# Altium footprint library George.PcbLib: 34 footprints (part 1 of 3)
Each footprint in its own frame and in the unit in brackets; x right, y up, seen from the top. Pads: shape width x height; smd on the part's side, far side on the other; paste and mask are expansions set on the pad; w line width, h text height; cw(c..) or ccw(c..) is an arc to the next point about the centre after c.
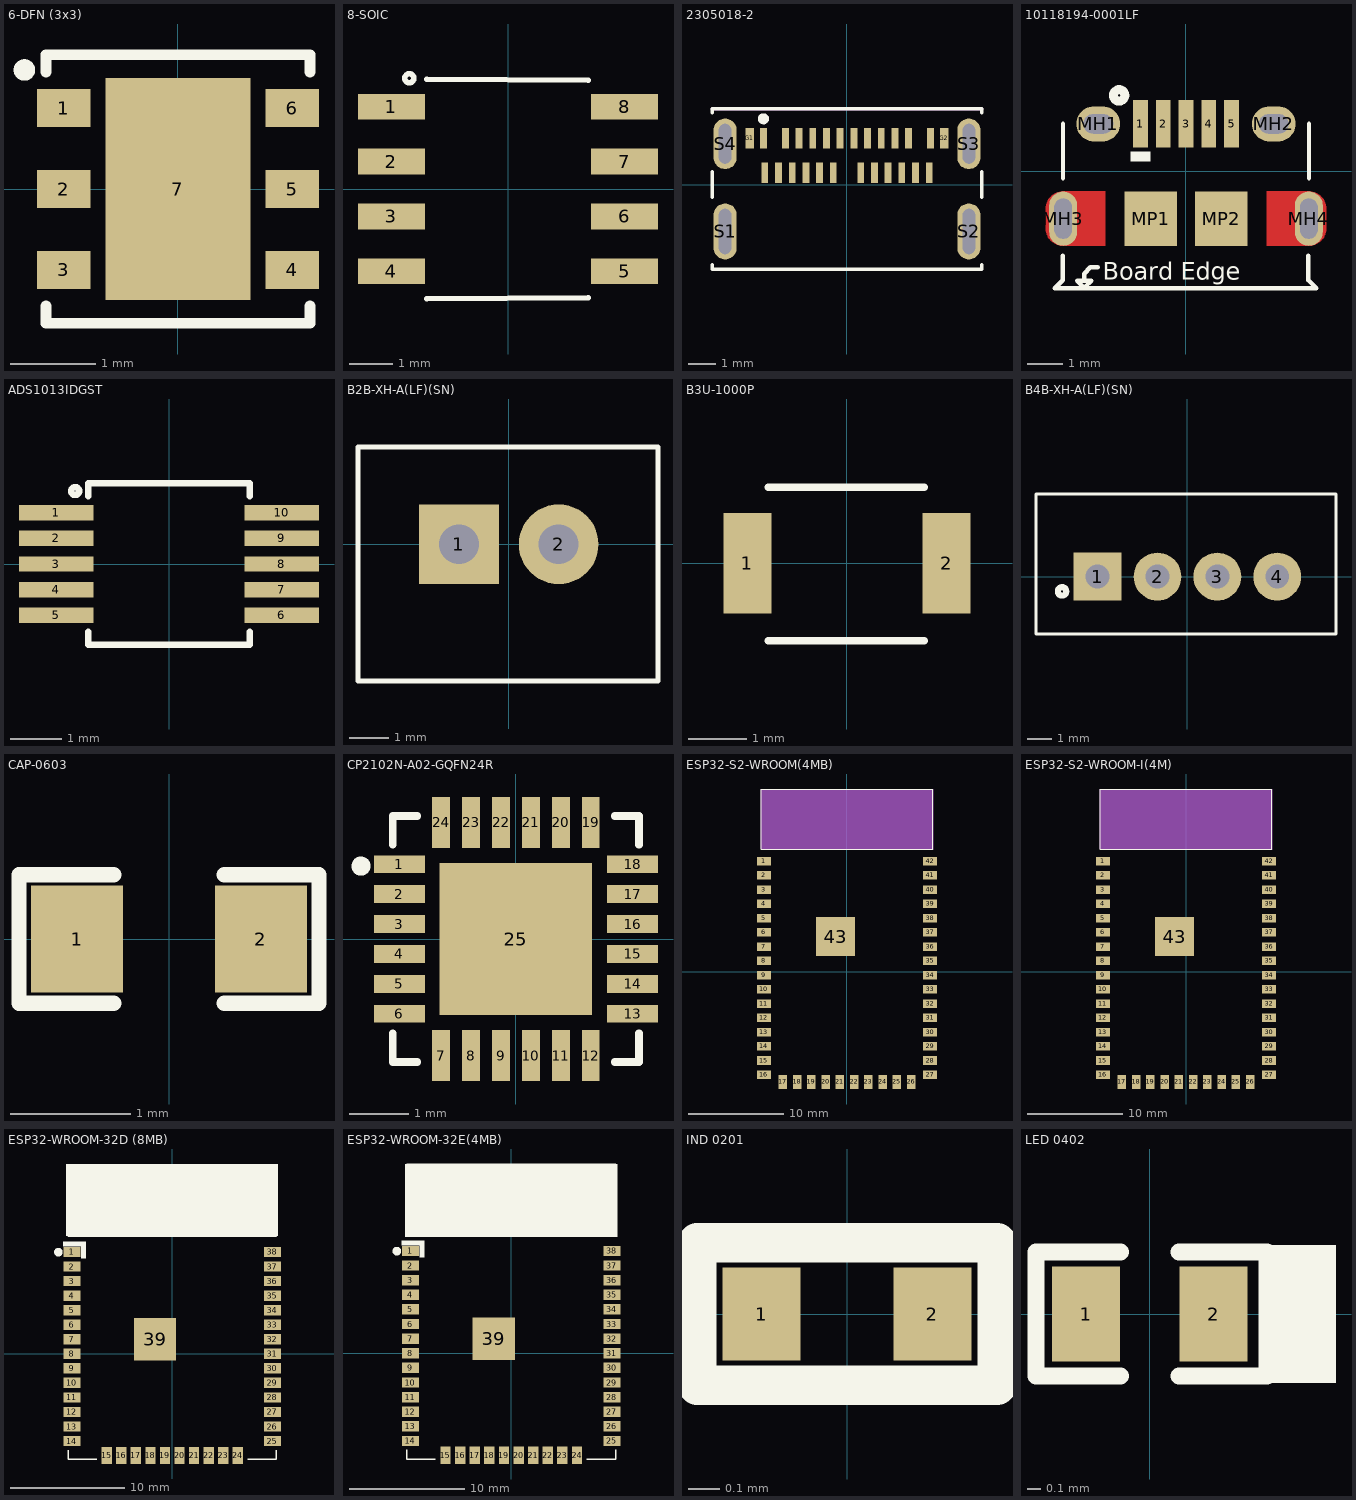
[diagram p0: the footprints below, top view; thin cyan lines are the x and y axes]

## 6-DFN (3x3) [mm]
pads (7):
  rect 0.63x0.45 smd: 1(-1.34,0.95) 2(-1.34,0) 3(-1.34,-0.95) 4(1.34,-0.95) 5(1.34,0) 6(1.34,0.95)
  rect 1.7x2.6 smd: 7(0,0)
Top Overlay:
  circle w0.127: c-1.803,1.397 r0.063
  lines w0.127: -1.549,-1.372 -1.549,-1.575 1.549,-1.575 1.549,-1.372 ; -1.549,1.372 -1.549,1.575 1.549,1.575 1.549,1.372
3D body "DFN6_3X3_ONS.step": height 0.99, standoff 0, extent -1.5,-1.5 1.498,1.498

## 8-SOIC [mm]
pads (8):
  rect 1.55x0.6 smd: 1(-2.7,1.905) 2(-2.7,0.635) 3(-2.7,-0.635) 4(-2.7,-1.905) 5(2.7,-1.905) 6(2.7,-0.635) 7(2.7,0.635) 8(2.7,1.905)
Top Overlay:
  circle w0.127: c-2.286,2.565 r0.105
  lines w0.127: -1.88,-2.54 1.854,-2.515 ; -1.88,2.54 1.854,2.515
3D body "SO8_STM.step": height 1.76, standoff 0, extent -3.073,-2.502 3.125,2.502

## 2305018-2 [mm]
pads (30):
  rect 0.25x0.75 smd: A1(-3.05,1.7) A2(-2.25,1.7) A3(-1.75,1.7) A4(-1.25,1.7) A5(-0.75,1.7) A6(-0.25,1.7) A7(0.25,1.7) A8(0.75,1.7) A9(1.25,1.7) A10(1.75,1.7) A11(2.25,1.7) A12(3.05,1.7) B1(3,0.45) B2(2.5,0.45) B3(2,0.45) B4(1.5,0.45) B5(1,0.45) B6(0.5,0.45) B7(-0.5,0.45) B8(-1,0.45) B9(-1.5,0.45) B10(-2,0.45) B11(-2.5,0.45) B12(-3,0.45)
  rect 0.3x0.75 smd: G1(-3.55,1.7) G2(3.55,1.7)
  oval 0.85x2.05 hole 0.45 slot 1.65 at 90 deg: S1(-4.45,-1.7) S2(4.45,-1.7)
  oval 0.85x1.85 hole 0.45 slot 1.45 at 90 deg: S3(4.45,1.5) S4(-4.45,1.5)
Top Overlay:
  circle w0.2: c-3.05,2.413 r0.1
  lines w0.127: -4.925,-2.906 -4.925,-3.075 4.925,-3.075 4.925,-2.906 ; -4.925,-0.444 -4.925,0.48 ; -4.925,2.634 -4.925,2.775 4.925,2.775 4.925,2.634 ; 4.925,-0.444 4.925,0.48
Mechanical 13:
  lines w0.127: -4.925,2.775 4.925,2.775
3D body "2305018-2--3DModel-STEP-56544.STEP": height 3.53, standoff -0.53, extent -4.919,-5.856 4.919,2.794

## 10118194-0001LF [mm]
pads (11):
  rect 0.42x1.35 smd: 1(-1.3,1.35) 2(-0.65,1.35) 3(0,1.35) 4(0.65,1.35) 5(1.3,1.35)
  oval 1.25x1 hole 0.55 slot 0.85 at 0 deg: MH1(-2.5,1.35) MH2(2.5,1.35)
  oval 0.8x1.55 hole 0.5 slot 1.15 at 90 deg: MH3(-3.5,-1.35) MH4(3.5,-1.35)
  rect 1.5x1.55 smd: MP1(-1,-1.35) MP2(1,-1.35)
Top Layer:
  region: 192 vertices and 0 holes, not listed, extent 2.3,-2.13 4,-0.575
  region: 192 vertices and 0 holes, not listed, extent -4,-2.125 -2.3,-0.57
Top Overlay:
  circle w0.254: c-1.905,2.163 r0.163
  rectangle: -1.575,0.283 -1.016,0.563
  lines w0.127: -3.511,-3.104 -3.511,-2.404 ; -3.511,-3.099 -3.511,-3.109 -3.739,-3.338 3.718,-3.338 3.489,-3.109 ; -3.505,-0.199 -3.505,1.35 ; -2.521,-2.74 -2.725,-2.74 -2.902,-2.918 -2.902,-3.121 ; 3.489,-3.104 3.489,-2.404 ; 3.505,-0.199 3.505,1.35 ; -2.902,-3.121 -2.699,-3.121 -2.862,-3.285 -2.942,-3.285 -3.106,-3.121 -2.902,-3.121
  text "Board Edge" at -2.367,-3.088 h0.5
3D body "10118194-0001LF--3DModel-STEP-56544.STEP": height 2.87, standoff -0.4, extent -4.017,-3.988 4.033,1.542
3D body: height 0.25, standoff 0, extent 2.622,-2.976 2.622,-2.976

## ADS1013IDGST [mm]
pads (10):
  rect 1.45x0.3 smd: 1(-2.2,1) 2(-2.2,0.5) 3(-2.2,0) 4(-2.2,-0.5) 5(-2.2,-1) 6(2.2,-1) 7(2.2,-0.5) 8(2.2,0) 9(2.2,0.5) 10(2.2,1)
Top Overlay:
  circle w0.127: c-1.829,1.422 r0.076
  lines w0.127: -1.575,-1.575 -1.575,-1.321 ; -1.575,1.321 -1.575,1.575 ; -1.549,-1.575 1.575,-1.575 1.575,-1.321 ; -1.549,1.575 1.575,1.575 1.575,1.321
3D body "ADS1013IDGST.STEP": height 1.09, standoff -0.01, extent -2.45,-1.5 2.45,1.5

## B2B-XH-A(LF)(SN) [mm]
pads (2):
  rect 2x2 hole 1: 1(-1.25,0)
  round 2 hole 1: 2(1.25,0)
Top Overlay:
  lines w0.127: -3.782,-3.432 -3.782,2.442 3.74,2.442 3.74,-3.432 -3.782,-3.432
3D body "B2B-XH-A(LF)(SN)--3DModel-STEP-56544.STEP": height 7, standoff -3.4, extent -3.718,-3.366 3.682,2.384

## B3U-1000P [mm] "SWITCH TACTILE SPST-NO 0.05A 12V"
pads (2):
  rect 0.82x1.72 smd: 1(-1.7,0) 2(1.7,0)
Top Overlay:
  lines w0.127: -1.346,-1.321 0,-1.321 1.321,-1.321 ; -1.346,1.295 0,1.295 1.321,1.295
3D body "User Library-OMRON B3U1000P.step": height 1.6, standoff 0, extent -2,-1.263 2,1.237

## B4B-XH-A(LF)(SN) [mm]
pads (4):
  rect 2x2 hole 1: 1(-3.75,0)
  round 2 hole 1: 2(-1.25,0) 3(1.25,0) 4(3.75,0)
Top Overlay:
  circle w0.254: c-5.236,-0.616 r0.176
  lines w0.127: -6.324,-2.398 6.204,-2.398 6.204,3.454 -6.324,3.454 -6.324,-2.398
3D body "B4B-XH-A-LF--SN---3DModel-STEP-56544.STEP": height 7, standoff -3.4, extent -6.258,-2.347 6.142,3.403

## CAP-0603 [mil]
pads (2):
  rect 30x35 smd mask+2.36: 1(-30,0) 2(30,0)
Top Overlay:
  lines w5: -18,-21 -49,-21 -49,21 -18,21 ; 18,-21 49,-21 49,21 18,21
3D body "User Library-CAPC1608X09.step": height 34.25, standoff -1.18, extent -31.51,-15.75 31.49,15.74

## CP2102N-A02-GQFN24R [mm]
pads (25):
  rect 0.85x0.3 smd: 1(-1.95,1.25) 2(-1.95,0.75) 3(-1.95,0.25) 4(-1.95,-0.25) 5(-1.95,-0.75) 6(-1.95,-1.25) 13(1.95,-1.25) 14(1.95,-0.75) 15(1.95,-0.25) 16(1.95,0.25) 17(1.95,0.75) 18(1.95,1.25)
  rect 0.3x0.85 smd: 7(-1.25,-1.95) 8(-0.75,-1.95) 9(-0.25,-1.95) 10(0.25,-1.95) 11(0.75,-1.95) 12(1.25,-1.95) 19(1.25,1.95) 20(0.75,1.95) 21(0.25,1.95) 22(-0.25,1.95) 23(-0.75,1.95) 24(-1.25,1.95)
  rect 2.55x2.55 smd: 25(0,0)
Top Overlay:
  circle w0.217: c-2.591,1.219 r0.051
  lines w0.127: -2.057,-1.575 -2.057,-2.057 -1.651,-2.057 ; -2.057,1.575 -2.057,2.057 -1.651,2.057 ; 1.651,-2.057 2.057,-2.057 2.057,-1.575 ; 1.651,2.057 2.057,2.057 2.057,1.575
3D body "CP2102N-A02-GQFN24R--3DModel-STEP-56544.STEP": height 0.8, standoff 0, extent -2,-2 2,2

## ESP32-S2-WROOM(4MB) [mm] "RX TXRX MOD WIFI SURFACE MOUNT"
pads (43):
  rect 1.5x0.9 smd: 1(-8.75,11.625) 2(-8.75,10.125) 3(-8.75,8.625) 4(-8.75,7.125) 5(-8.75,5.625) 6(-8.75,4.125) 7(-8.75,2.625) 8(-8.75,1.125) 9(-8.75,-0.375) 10(-8.75,-1.875) 11(-8.75,-3.375) 12(-8.75,-4.875) 13(-8.75,-6.375) 14(-8.75,-7.875) 15(-8.75,-9.375) 16(-8.75,-10.875) 27(8.75,-10.875) 28(8.75,-9.375) 29(8.75,-7.875) 30(8.75,-6.375) 31(8.75,-4.875) 32(8.75,-3.375) 33(8.75,-1.875) 34(8.75,-0.375) 35(8.75,1.125) 36(8.75,2.625) 37(8.75,4.125) 38(8.75,5.625) 39(8.75,7.125) 40(8.75,8.625) 41(8.75,10.125) 42(8.75,11.625)
  rect 0.9x1.5 smd: 17(-6.75,-11.625) 18(-5.25,-11.625) 19(-3.75,-11.625) 20(-2.25,-11.625) 21(-0.75,-11.625) 22(0.75,-11.625) 23(2.25,-11.625) 24(3.75,-11.625) 25(5.25,-11.625) 26(6.75,-11.625)
  rect 4.1x4.1 smd: 43(-1.19,3.675)
Top Overlay:
  lines w0.127: -9.025,12.875 -9.025,19.175 9.025,19.175 9.025,12.875 -9.025,12.875
Mechanical 1:
  pour cut-out: 9.1,19.225 -9.1,19.225 -9.1,12.8 9.1,12.8
  text "Board Cutout" at -3.748,15.652 h0.7
3D body "ESP32-S2-WROOM--3DModel-STEP-269445.STEP": height 3.45, standoff 0, extent -9,-11.875 9,19.125

## ESP32-S2-WROOM-I(4M) [mm] "18x31x3.3mm WiFi Modules ROHS"
pads (43):
  rect 1.5x0.9 smd: 1(-8.75,11.625) 2(-8.75,10.125) 3(-8.75,8.625) 4(-8.75,7.125) 5(-8.75,5.625) 6(-8.75,4.125) 7(-8.75,2.625) 8(-8.75,1.125) 9(-8.75,-0.375) 10(-8.75,-1.875) 11(-8.75,-3.375) 12(-8.75,-4.875) 13(-8.75,-6.375) 14(-8.75,-7.875) 15(-8.75,-9.375) 16(-8.75,-10.875) 27(8.75,-10.875) 28(8.75,-9.375) 29(8.75,-7.875) 30(8.75,-6.375) 31(8.75,-4.875) 32(8.75,-3.375) 33(8.75,-1.875) 34(8.75,-0.375) 35(8.75,1.125) 36(8.75,2.625) 37(8.75,4.125) 38(8.75,5.625) 39(8.75,7.125) 40(8.75,8.625) 41(8.75,10.125) 42(8.75,11.625)
  rect 0.9x1.5 smd: 17(-6.75,-11.625) 18(-5.25,-11.625) 19(-3.75,-11.625) 20(-2.25,-11.625) 21(-0.75,-11.625) 22(0.75,-11.625) 23(2.25,-11.625) 24(3.75,-11.625) 25(5.25,-11.625) 26(6.75,-11.625)
  rect 4.1x4.1 smd: 43(-1.19,3.675)
Top Overlay:
  lines w0.127: -9.025,12.875 -9.025,19.175 9.025,19.175 9.025,12.875 -9.025,12.875
Mechanical 1:
  pour cut-out: 9.1,19.225 -9.1,19.225 -9.1,12.8 9.1,12.8
  text "Board Cutout" at -3.748,15.652 h0.7
3D body "ESP32-S2-WROOM_M22S2H3200PH3Q0_.stp": height 3.3, standoff 0, extent -9,-11.875 9,19.125

## ESP32-WROOM-32D (8MB) [mm]
pads (39):
  rect 1.5x0.9 smd: 1(-8.75,8.88) 2(-8.75,7.61) 3(-8.75,6.34) 4(-8.75,5.07) 5(-8.75,3.8) 6(-8.75,2.53) 7(-8.75,1.26) 8(-8.75,-0.01) 9(-8.75,-1.28) 10(-8.75,-2.55) 11(-8.75,-3.82) 12(-8.75,-5.09) 13(-8.75,-6.36) 14(-8.75,-7.63) 25(8.75,-7.63) 26(8.75,-6.36) 27(8.75,-5.09) 28(8.75,-3.82) 29(8.75,-2.55) 30(8.75,-1.28) 31(8.75,-0.01) 32(8.75,1.26) 33(8.75,2.53) 34(8.75,3.8) 35(8.75,5.07) 36(8.75,6.34) 37(8.75,7.61) 38(8.75,8.88)
  rect 0.9x1.5 smd: 15(-5.71,-8.88) 16(-4.44,-8.88) 17(-3.17,-8.88) 18(-1.9,-8.88) 19(-0.63,-8.88) 20(0.64,-8.88) 21(1.91,-8.88) 22(3.18,-8.88) 23(4.45,-8.88) 24(5.72,-8.88)
  rect 3.7x3.7 smd: 39(-1.5,1.26)
Top Overlay:
  circle w0.5: c-9.931,8.865 r0.125
  rectangle: -9.521,9.362 -7.541,9.802
  rectangle: -7.959,8.328 -7.541,9.406
  pour cut-out: -9.246,16.561 -9.246,10.287 9.223,10.287 9.217,16.561
  lines w0.127: -9.089,-8.409 -9.089,-9.222 -6.6,-9.222 ; 6.583,-9.222 9.072,-9.222 9.072,-8.409 ; 9.086,10.244 -9.096,10.244 -9.096,16.434 9.091,16.434 9.091,10.244
Keep-Out Layer:
  rectangle: -9.042,10.287 9.042,16.383
3D body "esp-wroom-32.stp": height 3, standoff -0.04, extent -9.035,-9.157 9.035,16.383

## ESP32-WROOM-32E(4MB) [mm]
pads (39):
  rect 1.5x0.9 smd: 1(-8.75,8.88) 2(-8.75,7.61) 3(-8.75,6.34) 4(-8.75,5.07) 5(-8.75,3.8) 6(-8.75,2.53) 7(-8.75,1.26) 8(-8.75,-0.01) 9(-8.75,-1.28) 10(-8.75,-2.55) 11(-8.75,-3.82) 12(-8.75,-5.09) 13(-8.75,-6.36) 14(-8.75,-7.63) 25(8.75,-7.63) 26(8.75,-6.36) 27(8.75,-5.09) 28(8.75,-3.82) 29(8.75,-2.55) 30(8.75,-1.28) 31(8.75,-0.01) 32(8.75,1.26) 33(8.75,2.53) 34(8.75,3.8) 35(8.75,5.07) 36(8.75,6.34) 37(8.75,7.61) 38(8.75,8.88)
  rect 0.9x1.5 smd: 15(-5.71,-8.88) 16(-4.44,-8.88) 17(-3.17,-8.88) 18(-1.9,-8.88) 19(-0.63,-8.88) 20(0.64,-8.88) 21(1.91,-8.88) 22(3.18,-8.88) 23(4.45,-8.88) 24(5.72,-8.88)
  rect 3.7x3.7 smd: 39(-1.5,1.26)
Top Overlay:
  circle w0.5: c-9.931,8.865 r0.125
  rectangle: -7.959,8.328 -7.541,9.406
  rectangle: -9.521,9.362 -7.541,9.802
  pour cut-out: -9.22,16.434 9.195,16.434 9.195,10.135 -9.22,10.135
  lines w0.127: -9.089,-8.409 -9.089,-9.222 -6.6,-9.222 ; 6.583,-9.222 9.072,-9.222 9.072,-8.409 ; 9.086,10.244 -9.096,10.244 -9.096,16.434 9.091,16.434 9.091,10.244
Keep-Out Layer:
  rectangle: -9.042,10.287 9.042,16.383
3D body "esp-wroom-32.stp": height 3, standoff -0.04, extent -9.035,-9.157 9.035,16.383

## IND 0201 [mm]
pads (2):
  rect 0.25x0.3 smd mask+0.055: 1(-0.275,0) 2(0.275,0)
Top Overlay:
  lines w0.127: -0.483,-0.229 -0.483,0.229 0.483,0.229 0.483,-0.229 -0.483,-0.229
3D body "742692005.stp": height 0.15, standoff -0.15, extent -0.3,-0.15 0.3,0.15

## LED 0402 [mm] "LED BLUE CLEAR CHIP SMD"
pads (2):
  rect 0.5x0.7 smd: 1(-0.47,0) 2(0.47,0)
Top Overlay:
  rectangle: 0.864,-0.508 1.372,0.508
  lines w0.127: -0.216,-0.457 -0.838,-0.457 -0.838,0.457 -0.216,0.457 ; 0.216,-0.457 0.864,-0.457 0.864,0.457 0.216,0.457
3D body "APHHS1005.STEP": height 0.5, standoff 0, extent -0.5,-0.25 0.5,0.25